# Altium schematic symbol library TitansLib.SchLib: 462 symbols (part 2 of 24)
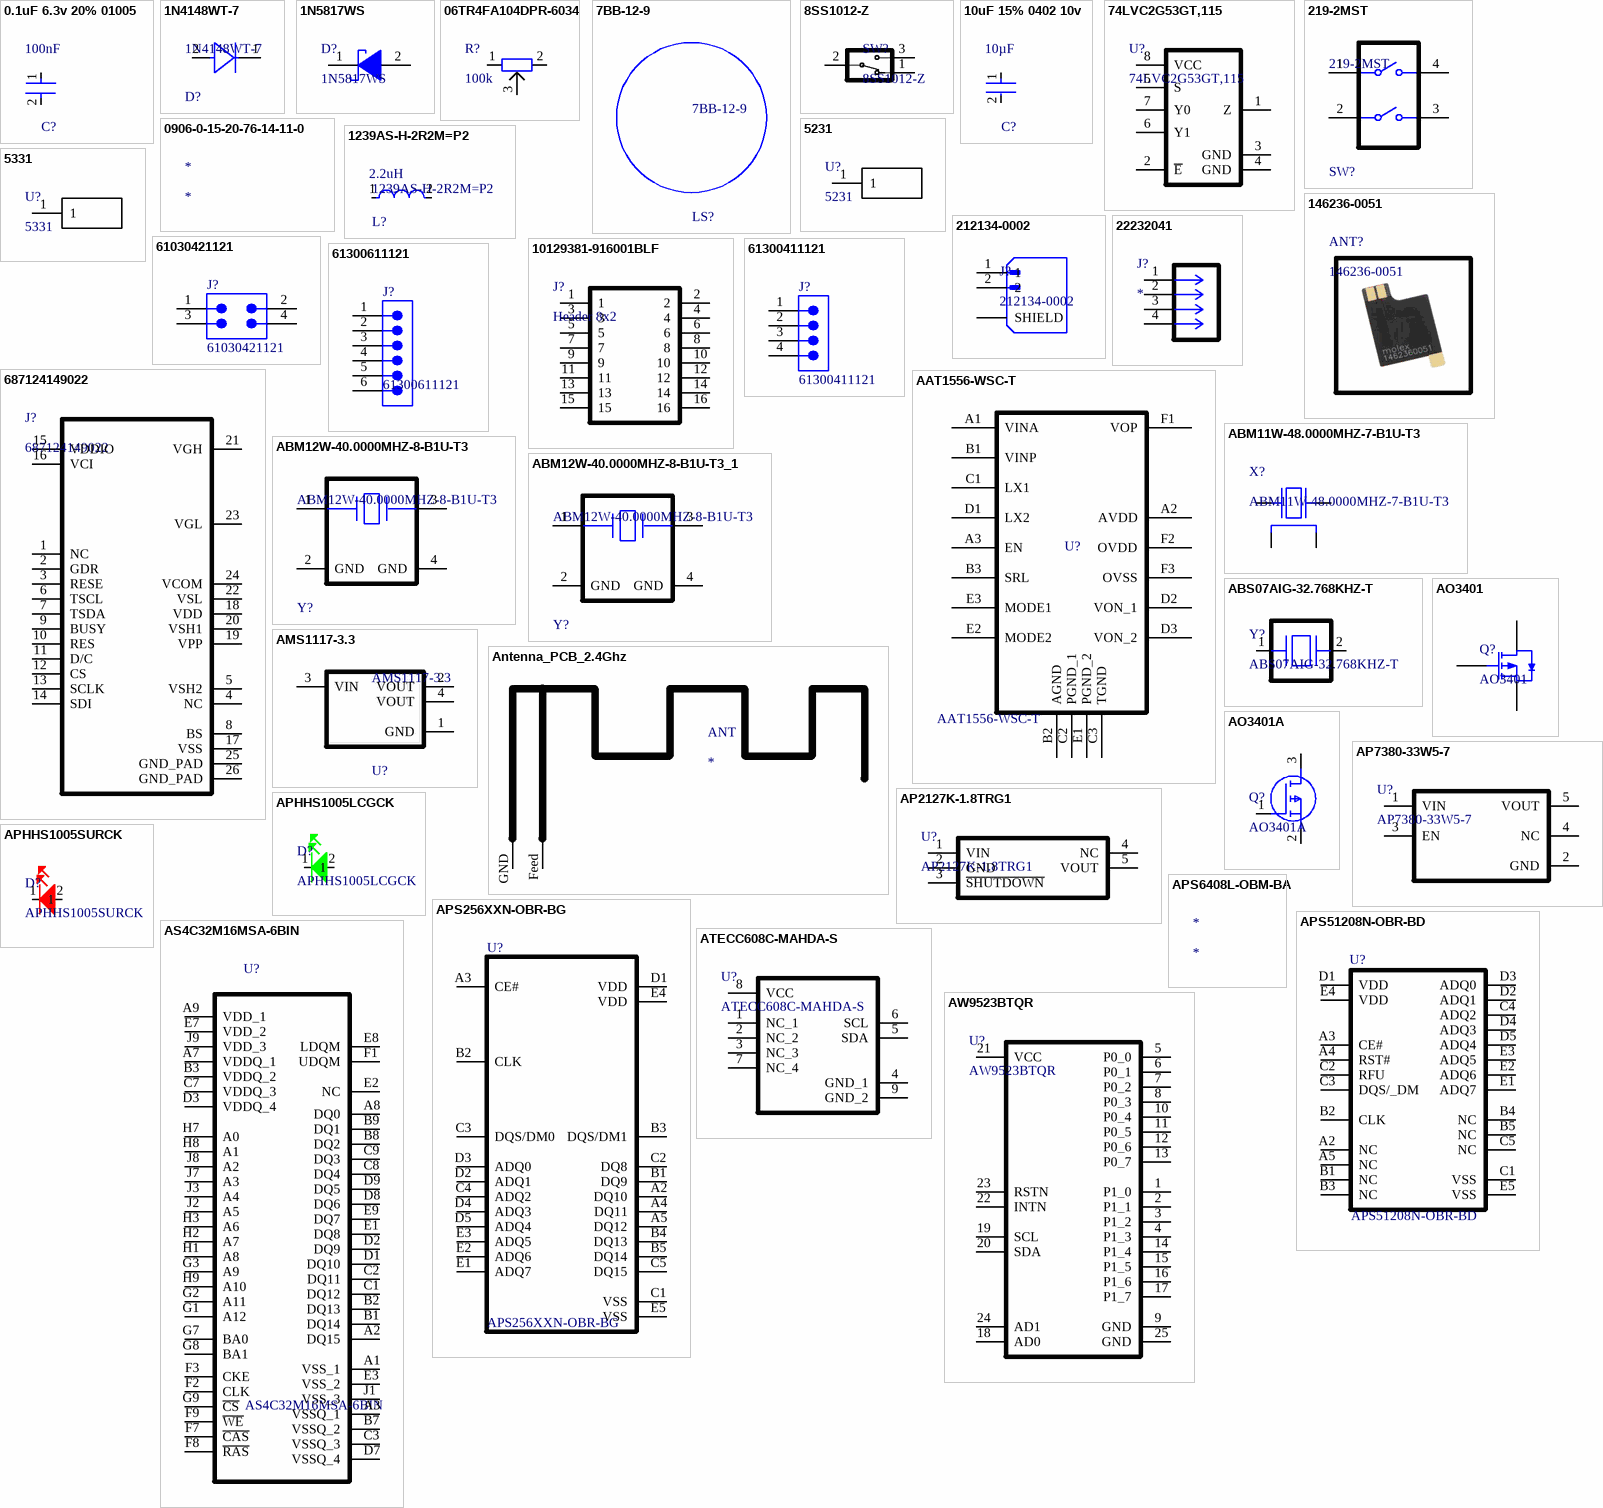
[diagram p18: symbols 0.1uF 6.3v 20% 01005 to AW9523BTQR]

## ABM12W-40.0000MHZ-8-B1U-T3_1
designator Y?, comment ABM12W-40.0000MHZ-8-B1U-T3
Crystal, Quartz, 40 MHz, SMD, 1.6mm x 1.2mm x 0.4mm, 10 ppm, 8 pF, 10 ppm, ABM12W; Manufacturer: Abracon; ESR (Equivalent Series Resistance): 80Ω; Frequency: 40MHz; Frequency Stability: 10ppm; Frequency Tolerance: 0.001%; Load Capacitance: 8pF; Supplier: DigiKey; Supplier Part Number: 535-13991-1-ND; Manufacturer Part Number: ABM12W-40.0000MHZ-8-B1U-T3; RoHS: Compliant; Category: Crystals; Stock: 8820; Pricing: 1=0.92, 10=0.803, 25=0.7596, 50=0.7284, 100=0.6982, 250=0.66028, 500=0.60768, 1000=0.58287 (USD); China RoHS: Compliant; Height: 400µm; Introduction Date: 2018-02-12; Length: 1.6mm; Lifecycle Status: Production; Max Operating Temperature: 70°C; Min Operating Temperature: -20°C; Mounting Technology: Surface Mount; REACH SVHC: Yes; ESR: 80Ω; Tolerance: 0.001%; Width: 1.2mm; ComponentLink1URL: https://datasheet.octopart.com:443/ABM12W-40.0000MHZ-8-B1U-T3-Abracon-datasheet-154833169.pdf?src-supplier=Master+Electronics; ComponentLink1Description: https://datasheet.octopart.com:443/ABM12W-40.0000MHZ-8-B1U-T3-Abracon-datasheet-154833169.pdf?src-supplier=Master+Electronics; ComponentLink2URL: https://datasheet.octopart.com:443/ABM12W-40.0000MHZ-8-B1U-T3-Abracon-datasheet-117059061.pdf?src-supplier=element14+APAC; ComponentLink2Description: https://datasheet.octopart.com:443/ABM12W-40.0000MHZ-8-B1U-T3-Abracon-datasheet-117059061.pdf?src-supplier=element14+APAC; ComponentLink3URL: https://datasheet.octopart.com:443/ABM12W-40.0000MHZ-8-B1U-T3-Abracon-datasheet-102760956.pdf?src-supplier=Sager+Electronics; ComponentLink3Description: https://datasheet.octopart.com:443/ABM12W-40.0000MHZ-8-B1U-T3-Abracon-datasheet-102760956.pdf?src-supplier=Sager+Electronics; ComponentLink4URL: https://sigma.octopart.com:443/141159861/technical_drawing/Abracon-ABM12W-40.0000MHZ-8-B1U-T3.pdf?src-supplier=Abracon+SCT; ComponentLink4Description: https://sigma.octopart.com:443/141159861/technical_drawing/Abracon-ABM12W-40.0000MHZ-8-B1U-T3.pdf?src-supplier=Abracon+SCT; ComponentLink5URL: http://sigma.octopart.com:80/conflict_mineral_statement/Abracon-company-27.pdf?src-supplier=Compliance+Statements; ComponentLink5Description: http://sigma.octopart.com:80/conflict_mineral_statement/Abracon-company-27.pdf?src-supplier=Compliance+Statements; Supplier 1: DigiKey; Supplier Part Number 1: 535-13991-1-ND; Supplier 2: DigiKey; Supplier Part Number 2: 535-13991-2-ND; Supplier 3: Mouser; Supplier Part Number 3: 815-12W40-8B1UT
footprint ABM12W
pins: 1, 2 GND (power), 3, 4 GND (power)

## ABS07AIG-32.768KHZ-T
designator Y?
Parallel - Fundamental Quartz Crystal, 0.032768MHz Nom; Manufacturer: Abracon; Supplier: Digikey; Supplier Part Number: 535-13348-1-ND; Manufacturer Part Number: ABS07AIG-32.768KHZ-T; RoHS: Yes; Category: Crystals; Stock: 246; Pricing: 1=0.56, 10=0.491, 25=0.4644, 50=0.445, 100=0.4266, 250=0.40344, 500=0.38168, 1000=0.37073 (USD); Crystal/Resonator Type: PARALLEL - FUNDAMENTAL; Manufacturer Series: ABS07AIG; Reach SVHC Compliant: Yes; RoHS Compliant: Yes; ComponentLink1URL: https://datasheet.ciiva.com:443/pdfs/VipMasterIC/IC/ABRC/ABRC-S-A0001742469/ABRC-S-A0001742469-1.pdf?src-supplier=IHS+Markit; ComponentLink1Description: https://datasheet.ciiva.com:443/pdfs/VipMasterIC/IC/ABRC/ABRC-S-A0001742469/ABRC-S-A0001742469-1.pdf?src-supplier=IHS+Markit; ComponentLink2URL: http://www.farnell.com/datasheets/2581430.pdf?src-supplier=Farnell; ComponentLink2Description: http://www.farnell.com/datasheets/2581430.pdf?src-supplier=Farnell; ComponentLink3URL: https://abracon.com/Support/flyer/AutoGrade-AIG-Crystals.pdf?src-supplier=Digikey; ComponentLink3Description: https://abracon.com/Support/flyer/AutoGrade-AIG-Crystals.pdf?src-supplier=Digikey; ComponentLink4URL: https://abracon.com/AIGcrystals/ABS07AIG.pdf?src-supplier=Digikey; ComponentLink4Description: https://abracon.com/AIGcrystals/ABS07AIG.pdf?src-supplier=Digikey; ComponentLink5URL: https://datasheet.octopart.com/ABS07AIG-32.768KHZ-T-Abracon-datasheet-103422647.pdf?src-supplier=Future+Electronics; ComponentLink5Description: https://datasheet.octopart.com/ABS07AIG-32.768KHZ-T-Abracon-datasheet-103422647.pdf?src-supplier=Future+Electronics; ComponentLink6URL: https://datasheet.octopart.com/ABS07AIG-32.768KHZ-T-Abracon-datasheet-101745425.pdf?src-supplier=Master+Electronics; ComponentLink6Description: https://datasheet.octopart.com/ABS07AIG-32.768KHZ-T-Abracon-datasheet-101745425.pdf?src-supplier=Master+Electronics
footprint ABS07AIG-32.768KHZ-T
pins: 1, 2

## AMS1117-3.3
designator U?
LDO Voltage Regulators 1A, 3.3V; Manufacturer: Advanced Monolithic Systems; Dropout Voltage: 1.1V; Output Type: Fixed; Nominal Supply Current: 5mA; Max Power Dissipation: 1.2W; Max Supply Voltage: 15V; Number Of Outputs: 1; Standoff Height: 0.64mm; Max Junction Temp: +125°C; Height: 1.8mm; Package: AMS1117; Device Class L2: Power Management ICs; ComponentLink2Description: Datasheet; ComponentLink2URL: http://www.advanced-monolithic.com/pdf/ds1117.pdf; Category: IC; RoHS: TRUE; Automotive: No; Device Class L1: Integrated Circuits (ICs); Output Current: 1A; Device Class L3: Voltage Regulators - Linear; Temperature: -40°C to +125°C; Output Voltage: 3.3V; Manufacturer Part Number: AMS1117-3.3; Temperature Range Low: -40°C; Octopart: https://octopart.com/ams1117-3.3-advanced+monolithic+systems-25899300; Lead Free: Yes; Ipc Land Pattern Name: SOT229P700X180-4; Temperature Range High: +125°C
footprint FP-ams1117-IPC_A
footprint FP-ams1117-IPC_B
footprint FP-ams1117-IPC_C
pins: 1 GND (power), 2 VOUT, 3 VIN (power), 4 VOUT

## Antenna_PCB_2.4Ghz
designator ANT
ST ELECTRONICS BASED ANTENNA DESIGN
footprint Antenna_PCB_2.4Ghz_ftprt
pins: Feed, GND

## AO3401
designator Q?
Small Signal Field-Effect Transistor, 4A I(D), 30V, 1-Element, P-Channel, Silicon, Metal-oxide Semiconductor FET; Manufacturer: Alpha & Omega Semiconductor; Manufacturer Part Number: AO3401A; Package Body Material: Plastic; Drain-source On Resistance-Max: 50mR; Number of Elements: 1; Operating Mode: ENHANCEMENT MODE; Transistor Application: SWITCHING; Power Dissipation-Max (Abs): 1.4W; Supplier: Digikey; Supplier Part Number: 785-1001-1-ND; RoHS: Yes; Category: MOSFETs; Stock: 390364; Pricing: 1=0.46, 10=0.282, 100=0.1787, 500=0.1337, 1000=0.11915, 3000=0.10063, 6000=0.0913, 9000=0.08654, 15000=0.08118, 21000=0.07801, 30000=0.07493, 75000=0.06817 (USD); Pins: 3; Package Shape: Rectangular; Transistor Element Material: SILICON; Max Operating Temperature: 150°C; Polarity/Channel Type: P-CHANNEL; Drain Current-Max (ID): 4A; DS Breakdown Voltage-Min: 30V; FET Technology: METAL-OXIDE SEMICONDUCTOR; JESD-30 Code: R-PDSO-G3; Package Style: SMALL OUTLINEMeter; Surface Mount: Yes; Terminal Form: Gull Wing; Terminal Position: DUAL; Drain Current-Max (Abs) (ID): 4A; RoHS Compliant: Yes; Reach SVHC Compliant: Yes; ComponentLink1URL: https://datasheet.ciiva.com:443/pdfs/VipMasterIC/IC/ALOM/ALOMS00379/ALOMS00379-1.pdf?src-supplier=IHS+Markit; ComponentLink1Description: https://datasheet.ciiva.com:443/pdfs/VipMasterIC/IC/ALOM/ALOMS00379/ALOMS00379-1.pdf?src-supplier=IHS+Markit; ComponentLink2URL: https://datasheet.ciiva.com/940/ao3401a-940720.pdf?src-supplier=Digikey; ComponentLink2Description: https://datasheet.ciiva.com/940/ao3401a-940720.pdf?src-supplier=Digikey; ComponentLink3URL: https://datasheet.ciiva.com/26927/getdatasheetpartid-79048-26927888.pdf?src-supplier=Verical; ComponentLink3Description: https://datasheet.ciiva.com/26927/getdatasheetpartid-79048-26927888.pdf?src-supplier=Verical
footprint SOT23-3 (SOT23, 3-Leads, Body 2,93x2,66mm, Pitch 0,95mm, IPC Low Density)
pins: 1 G, 2 S, 3 D

## AO3401A
designator Q?
MOSFET P-CH 30V 4A SOT-23; Manufacturer 1: Alpha & Omega Semiconductors; Datasheet Link: https://www.lcsc.com/datasheet/C15127.pdf; Height: 1.25mm; Manufacturer Part Number 1: AO3401A; Supplier Part Number 1: C15127; Supplier 1: LCSC; Supplier Unit Price 1: 0.0583; Supplier Link 1: https://www.lcsc.com/product-detail/C15127.html?s_z=n_AO3401A
footprint SOT95P280X125-3N
pins: 1 G, 2 S, 3 D

## AP2127K-1.8TRG1
designator U?
LDO Voltage Regulators 300mA CMOS LDO 2.5V to 6V; Manufacturer_Name: Diodes Incorporated; Datasheet Link: https://www.diodes.com//assets/Datasheets/AP2127.pdf; Height: 1.45mm; Manufacturer Part Number: AP2127K-1.8TRG1; Mouser Part Number: 621-AP2127K-1.8TRG1; Mouser Price/Stock: https://www.mouser.co.uk/ProductDetail/Diodes-Incorporated/AP2127K-1.8TRG1?qs=x6A8l6qLYDDmU4WXw4%252BBlA%3D%3D; Arrow Part Number: AP2127K-1.8TRG1; Arrow Price/Stock: https://www.arrow.com/en/products/ap2127k-1.8trg1/diodes-incorporated?region=nac; Supplier 1: DigiKey; Supplier Part Number 1: AP2127K-1.8TRG1DICT-ND; Supplier 2: DigiKey; Supplier Part Number 2: AP2127K-1.8TRG1DIDKR-ND; Supplier 3: Mouser; Supplier Part Number 3: 621-AP2127K-1.8TRG1
footprint SOT95P280X145-5N (SOT23, 5-Leads, Body 2.90x2.80mm, Pitch 0.95mm, IPC Medium Density)
pins: 1 VIN, 2 GND, 3 ~{SHUTDOWN}, 4 NC, 5 VOUT

## AP7380-33W5-7
designator U?
AP7380 Series 150 mA 3.3V Positive Voltage Surface Mount ULDO Regulator - SOT-25; Manufacturer 1: Diodes Inc.; Max Supply Voltage: 24V; Max Junction Temperature (Tj): 125°C; Min Input Voltage: 3.5V; Number of Channels: 1; Voltage Tolerance: 1%; Supplier 1: DigiKey; Supplier Part Number 1: AP7380-33W5-7DICT-ND; Manufacturer Part Number 1: AP7380-33W5-7; RoHS: Compliant; Category: LDO Voltage Regulators; Stock: 14975; Supplier Unit Price 1: 0.27; China RoHS: Compliant; Height - Seated (Max): 1.4mm; Length: 3mm; Lifecycle Status: Production; Number of Circuits: 1; Number of Outputs: 1; Number of Terminals: 5; Output Voltage: 3.3V; REACH SVHC: Yes; Schedule B: 8542390000|8542390000|8542390000|8542390000|8542390000|8542390000|8542390000|8542390000|8542390000|8542390000|8542390000|8542390000|8542390000|8542390000|8542390000|8542390000|8542390000|8542390000|8542390000|8542390000|8542390000|8542390000|8542390000|85; Terminal Pitch: 950µm; Width: 1.6mm; ComponentLink1URL: https://datasheet.octopart.com:443/AP7380-33W5-7-Diodes-Inc.-datasheet-141402626.pdf?src-supplier=IHS; ComponentLink1Description: https://datasheet.octopart.com:443/AP7380-33W5-7-Diodes-Inc.-datasheet-141402626.pdf?src-supplier=IHS; ComponentLink2URL: https://datasheet.octopart.com:443/AP7380-33W5-7-Diodes-Inc.-datasheet-99887085.pdf?src-supplier=HQonline; ComponentLink2Description: https://datasheet.octopart.com:443/AP7380-33W5-7-Diodes-Inc.-datasheet-99887085.pdf?src-supplier=HQonline
footprint SOT95P285X140-5N (SOT23, 5-Leads, Body 3.00x2.85mm, Pitch 0.95mm, IPC Medium Density)
pins: 1 VIN, 2 GND, 3 EN, 4 NC, 5 VOUT

## APHHS1005LCGCK
designator D?
1.9 V 0402 3.5mcd Green Clear 570nm Rectangle Flat Top Surface Mount LED - SMD-2; Manufacturer: Kingbright; Forward Current: 30mA; Number of Circuits: 1; Peak Wavelength: 574nm; Shape: Rectangular; Viewing Angle: 120°; Supplier: DigiKey; Supplier Part Number: 754-2121-1-ND; Manufacturer Part Number: APHHS1005LCGCK; RoHS: Compliant; Category: LEDs; Stock: 59903; Pricing: 1=0.32, 10=0.222, 100=0.1567, 500=0.12708, 1000=0.11731 (USD); China RoHS: Compliant; Color: Green; Contact Plating: Tin; Height: 500µm; Lifecycle Status: Production; Luminous Intensity: 3.5mcd; Max Operating Temperature: 85°C; Min Operating Temperature: -40°C; Mounting Technology: Surface Mount; Number of Terminals: 2; REACH SVHC: Yes; Schedule B: 8541402000, 8541402000|8541402000|8541402000|8541402000|8541402000; Terminal Pitch: 900µm; Wavelength: 570nm; ComponentLink1URL: https://datasheet.octopart.com:443/APHHS1005LCGCK-Kingbright-datasheet-180516598.pdf?src-supplier=IHS; ComponentLink1Description: https://datasheet.octopart.com:443/APHHS1005LCGCK-Kingbright-datasheet-180516598.pdf?src-supplier=IHS; ComponentLink2URL: https://datasheet.octopart.com:443/APHHS1005LCGCK-Kingbright-datasheet-155662661.pdf?src-supplier=Future+Electronics; ComponentLink2Description: https://datasheet.octopart.com:443/APHHS1005LCGCK-Kingbright-datasheet-155662661.pdf?src-supplier=Future+Electronics; ComponentLink3URL: https://datasheet.octopart.com:443/APHHS1005LCGCK-Kingbright-datasheet-145361705.pdf?src-supplier=Kingbright+SCT; ComponentLink3Description: https://datasheet.octopart.com:443/APHHS1005LCGCK-Kingbright-datasheet-145361705.pdf?src-supplier=Kingbright+SCT
footprint APHHS1005LCGCK
pins: 1, 2

## APHHS1005SURCK
designator D?
APHHS1005SURCK Red Led, 630 Nm 1005 (0402) Clear, Rectangle Lens SMD Package; Manufacturer: Kingbright; Dominant Wavelength: 630nm; Forward Current: 30mA; Forward Voltage: 2.5V; Lens Style: Clear, Flat; Luminous Intensity: 140mcd; Max Junction Temperature (Tj): 115°C; Number of Circuits: 1; Peak Wavelength: 650nm; Power Dissipation: 75mW; Reverse Voltage: 5V; Shape: Rectangular; Test Current: 20mA; Viewing Angle: 120°; Supplier: DigiKey; Supplier Part Number: 754-1104-6-ND; Manufacturer Part Number: APHHS1005SURCK; RoHS: Compliant; Category: LEDs; Stock: 213656; Pricing: 1=0.31, 10=0.215, 100=0.1517, 500=0.12294, 1000=0.11343 (USD); Case/Package: 0402; Case Code (Imperial): 0402; Case Code (Metric): 1005; China RoHS: Compliant; Color: Red; Height: 500µm; Illumination Color: Red; Lead Free: Lead Free; Length: 1mm; Lens Color: Clear; Lifecycle Status: Production; Max Operating Temperature: 85°C; Min Operating Temperature: -40°C; Mounting Technology: Surface Mount; Number of LEDs: 1; Pins: 2; Number of Terminals: 2; Packaging: Cut Tape (CT); REACH SVHC: Yes; Schedule B: 8541402000, 8541402000|8541402000, 8541402000|8541402000|8541402000, 8541402000|8541402000|8541402000|8541402000; Terminal Pitch: 1.1mm; Wavelength: 630nm; Width: 500µm; ComponentLink1URL: https://datasheet.octopart.com:443/APHHS1005SURCK-Kingbright-datasheet-180516619.pdf?src-supplier=IHS; ComponentLink1Description: https://datasheet.octopart.com:443/APHHS1005SURCK-Kingbright-datasheet-180516619.pdf?src-supplier=IHS; ComponentLink2URL: https://datasheet.octopart.com:443/APHHS1005SURCK-Kingbright-datasheet-180508364.pdf?src-supplier=IHS; ComponentLink2Description: https://datasheet.octopart.com:443/APHHS1005SURCK-Kingbright-datasheet-180508364.pdf?src-supplier=IHS; ComponentLink3URL: https://datasheet.octopart.com:443/APHHS1005SURCK-Kingbright-datasheet-137333100.pdf?src-supplier=Kingbright+SCT; ComponentLink3Description: https://datasheet.octopart.com:443/APHHS1005SURCK-Kingbright-datasheet-137333100.pdf?src-supplier=Kingbright+SCT; ComponentLink4URL: https://datasheet.octopart.com:443/APHHS1005SURCK-Kingbright-datasheet-12529969.pdf?src-supplier=Sager+Electronics; ComponentLink4Description: https://datasheet.octopart.com:443/APHHS1005SURCK-Kingbright-datasheet-12529969.pdf?src-supplier=Sager+Electronics; ComponentLink5URL: https://datasheet.octopart.com:443/APHHS1005SURCK-Kingbright-datasheet-9635231.pdf?src-supplier=RS+(Formerly+Allied+Electronics); ComponentLink5Description: https://datasheet.octopart.com:443/APHHS1005SURCK-Kingbright-datasheet-9635231.pdf?src-supplier=RS+(Formerly+Allied+Electronics)
footprint APHHS1005SURCK
pins: 1, 2

## APS256XXN-OBR-BG
designator U?
Memory, DDR PSRAM, 1V8, 256Mbit, 200MHz, BGA-24; Manufacturer: AP Memory; ComponentLink1URL: http://tunmcdsvn.tun.st.com/Component_Documentation_Library/Trunk/IC/AP_MEMORY_TECHNOLOGY_CORP_APS256XXN-OBR-BG; Supplier: Mouser; Supplier Part Number: 878-APS256XXN-OBR-BG; Manufacturer Part Number: APS256XXN-OBR-BG; Category: Uncategorized; Stock: 11795; Pricing: 1=3.03, 10=2.72, 50=2.53, 100=2.39, 1000=2.19, 10000=2.11 (USD); Supplier 1: Mouser; Supplier Part Number 1: 878-APS256XXN-OBR-BG
footprint ICC_BGA24_5X5-BALL-ARRAY_6X8_P1
pins: A2 DQ10, A3 CE#, A4 DQ11, A5 DQ12, B1 DQ9, B2 CLK, B3 DQS/DM1, B4 DQ13, B5 DQ14, C1 VSS, C2 DQ8, C3 DQS/DM0, C4 ADQ2, C5 DQ15, D1 VDD, D2 ADQ1, D3 ADQ0, D4 ADQ3, D5 ADQ4, E1 ADQ7, E2 ADQ6, E3 ADQ5, E4 VDD, E5 VSS

## APS6408L-OBM-BA
designator *

## APS51208N-OBR-BD
designator U?
DRAM IoT RAM 512Mb OPI (x8) DDR 200MHz, 1.8V, Ind. Temp., BGA24; Manufacturer_Name: AP Memory; Geometry.Height: 1.2mm; Manufacturer_Part_Number: APS51208N-OBR-BD; Mouser Part Number: 878-APS51208N-OBR-BD; Mouser Price/Stock: https://www.mouser.co.uk/ProductDetail/AP-Memory/APS51208N-OBR-BD?qs=IS%252B4QmGtzzoQA3huE4r%252BOw%3D%3D; Arrow Part Number: *; Arrow Price/Stock: *; Datasheet Link: https://www.mouser.de/datasheet/2/1127/APM_PSRAM_OPI_Xccela_APS25608N_OBRx_v1_0_PKG-1954871.pdf
footprint BGA24C100P5X5_600X800X120
pins: A2 NC, A3 CE#, A4 RST#, A5 NC, B1 NC, B2 CLK, B3 NC, B4 NC, B5 NC, C1 VSS, C2 RFU, C3 DQS/_DM, C4 ADQ2, C5 NC, D1 VDD, D2 ADQ1, D3 ADQ0, D4 ADQ3, D5 ADQ4, E1 ADQ7, E2 ADQ6, E3 ADQ5, E4 VDD, E5 VSS

## AS4C32M16MSA-6BIN
designator U?
DRAM 512M 166MHz 32Mx16 Mobile LP SDRAM IT; Manufacturer_Name: Alliance Memory; Geometry.Height: 1mm; Mouser Part Number: 913-AS4C32M16MSA6BIN; Mouser Price/Stock: https://www.mouser.co.uk/ProductDetail/Alliance-Memory/AS4C32M16MSA-6BIN?qs=rrS6PyfT74fTK5vqF8kDKg%3D%3D; Manufacturer_Part_Number: AS4C32M16MSA-6BIN; Datasheet Link: https://www.mouser.co.uk/datasheet/2/12/20180115_AllianceMemory_512M_LPSDRAM_AS4C32M16MSA--1282155.pdf
footprint BGA54C80P9X9_800X800X100
footprint AS4C32M16MSA-6BIN (BGA54C80P9X9_800X800X100)
pins: A1 VSS_1, A2 DQ15, A3 VSSQ_1, A7 VDDQ_1, A8 DQ0, A9 VDD_1, B1 DQ14, B2 DQ13, B3 VDDQ_2, B7 VSSQ_2, B8 DQ2, B9 DQ1, C1 DQ12, C2 DQ11, C3 VSSQ_3, C7 VDDQ_3, C8 DQ4, C9 DQ3, D1 DQ10, D2 DQ9, D3 VDDQ_4, D7 VSSQ_4, D8 DQ6, D9 DQ5, E1 DQ8, E2 NC, E3 VSS_2, E7 VDD_2, E8 LDQM, E9 DQ7, F1 UDQM, F2 CLK, F3 CKE, F7 ~{CAS}, F8 ~{RAS}, F9 ~{WE}, G1 A12, G2 A11, G3 A9, G7 BA0, G8 BA1, G9 ~{CS}, H1 A8, H2 A7, H3 A6, H7 A0, H8 A1, H9 A10, J1 VSS_3, J2 A5, J3 A4, J7 A3, J8 A2, J9 VDD_3

## ATECC608C-MAHDA-S
designator U?
Security ICs / Authentication ICs ECC/ECDH, I2C, small 3K reel UDFN; Manufacturer 1: Microchip; Datasheet Link: https://ww1.microchip.com/downloads/aemDocuments/documents/SCBU/ProductDocuments/DataSheets/ATECC608C-CryptoAuthentication-Summary-Data-Sheet-DS40002513.pdf; Height: 0.6mm; Manufacturer Part Number 1: ATECC608C-MAHDA-S; Supplier Part Number 1: 579-ATECC608CMAHDAS; Supplier Unit Price 1: 0.8; Supplier 1: Mouser; Supplier Link 1: https://www.mouser.com/ProductDetail/Microchip-Technology/ATECC608C-MAHDA-S?qs=pBunHO6%252BwtFnBbwu0VNrWg%3D%3D&srsltid=AfmBOoo8i3_opzmZCJ-imqKuYkWUpJbPU66Vno_jvZ8jLd-lzOjjlhRU
footprint SON50P300X200X60-9N
pins: 1 NC_1, 2 NC_2, 3 NC_3, 4 GND_1, 5 SDA, 6 SCL, 7 NC_4, 8 VCC, 9 GND_2

## AW9523BTQR
designator U?
16 400kHz I2C TQFN-24-EP(4x4) I/O Expanders ROHS; Manufacturer: AWINIC; Manufacturer Part Number: AW9523BTQR; Supplier: LCSC
footprint QFN50P400X400X75_HS-25N (QFN, 24-Leads, Body 4.00x4.00mm, Pitch 0.50mm, Thermal Pad 2.70x2.70mm, IPC Medium Density)
pins: 1 P1_0, 2 P1_1, 3 P1_2, 4 P1_3, 5 P0_0, 6 P0_1, 7 P0_2, 8 P0_3, 9 GND, 10 P0_4, 11 P0_5, 12 P0_6, 13 P0_7, 14 P1_4, 15 P1_5, 16 P1_6, 17 P1_7, 18 AD0, 19 SCL, 20 SDA, 21 VCC, 22 INTN, 23 RSTN, 24 AD1, 25 GND

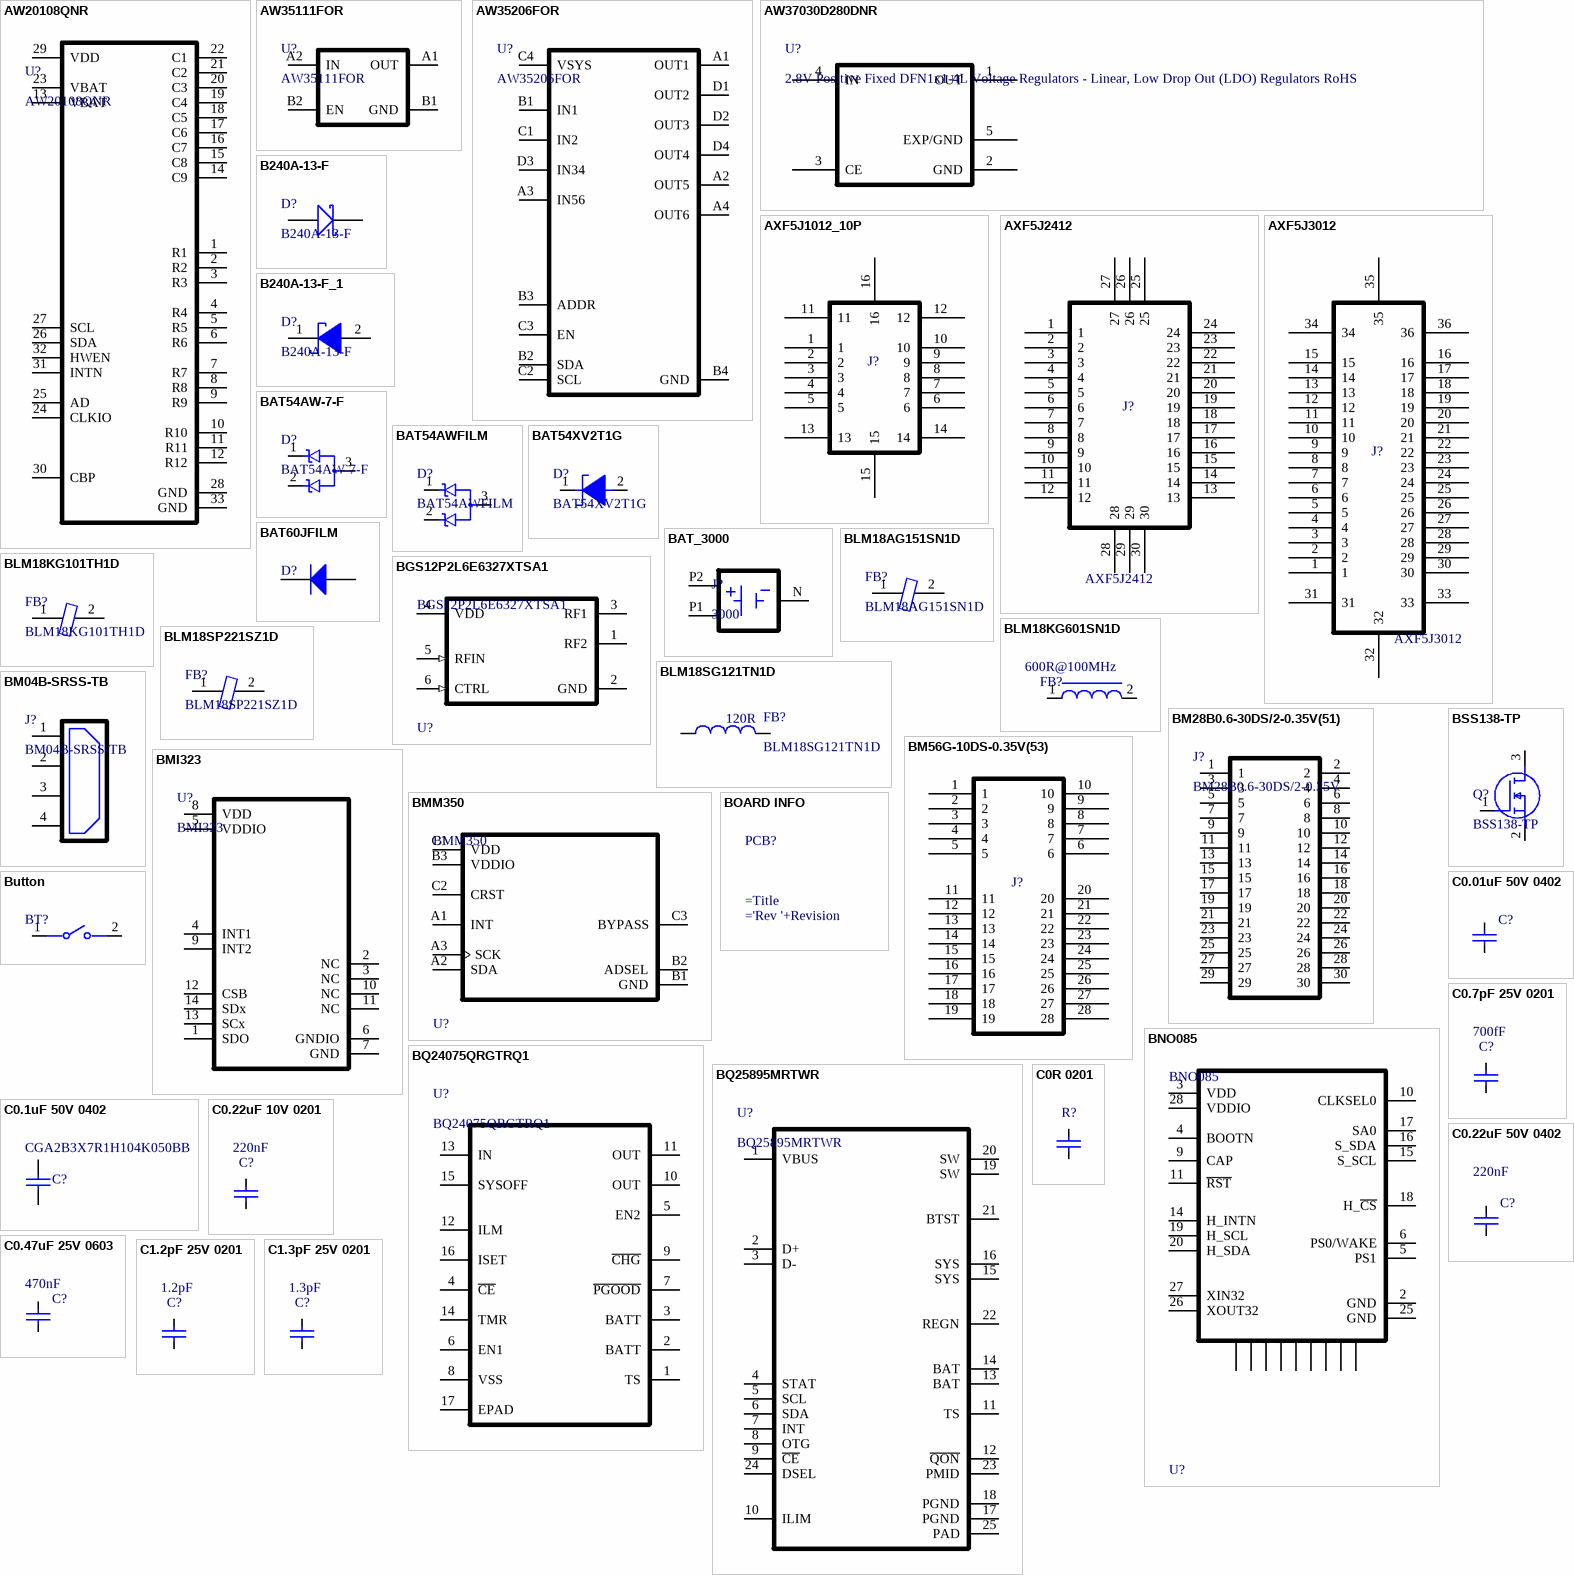
[diagram p1: symbols AW20108QNR to C1.3pF 25V 0201]

## AW20108QNR
designator U?
9×12 MATRIX LED DRIVER WITH AUTO BREATH; Manufacturer: awinic; Manufacturer Part Number: AW20108QNR; Category: Integrated Circuit; ComponentLink1Description: LCSC; ComponentLink1URL: https://www.lcsc.com/product-detail/C401022.html?s_z=n_AW20108QNR
footprint AW20108QNR (QFN, 32-Leads, Body 4.00x4.00mm, Pitch 0.40mm, Thermal Pad 2.60x2.60mm, IPC Medium Density)
pins: 1 R1, 2 R2, 3 R3, 4 R4, 5 R5, 6 R6, 7 R7, 8 R8, 9 R9, 10 R10, 11 R11, 12 R12, 13 VBAT, 14 C9, 15 C8, 16 C7, 17 C6, 18 C5, 19 C4, 20 C3, 21 C2, 22 C1, 23 VBAT, 24 CLKIO, 25 AD, 26 SDA, 27 SCL, 28 GND, 29 VDD, 30 CBP, 31 INTN, 32 HWEN, 33 GND

## AW35111FOR
designator U?
Manufacturer Part Number: AW35111FOR
footprint BGA4C40P2X2_80X80X54 (BGA, 4-Leads, Body 0.80x0.80mmx0.54mm, Pitch 0.40mm)
pins: A1 OUT, A2 IN, B1 GND, B2 EN

## AW35206FOR
designator U?
Single-bit dual-supply transceiver with configurable voltage-level shifting 6-SC70 -40 to 125; Manufacturer: AWINIC; Manufacturer Lifecycle Status: ACTIVE; Maximum Continuous Current: 2; Input voltage: 1.2V to 5.5V; Supply voltage: 1.5V to 5.5V; Data Rate: 420Mbps; Max Junction Temperature (Tj): 150°C; Nominal Supply Current: 3µA; Number of Bits: 1; Propagation Delay: 11ns; Topology: Push-Pull; Manufacturer Part Number: AW35206FOR; Supplier: DigiKey; Supplier Part Number: 296-SN74LXCH1T45DCKRCT-ND; RoHS: Compliant; Category: Voltage Level Shifters; Stock: 3155; Pricing: 1=0.67, 10=0.473, 25=0.4244, 100=0.3711, 250=0.34556, 500=0.33016, 1000=0.32436 (USD); Ambient Temperature Range High: 125°C; Height: 1.1mm; Length: 2mm; Lifecycle Status: Production; Max Operating Temperature: 125°C; Min Operating Temperature: -40°C; Number of Circuits: 1; Number of Inputs: 1; Number of Outputs: 1; Pins: 6; Thickness: 900µm; Width: 1.25mm; ComponentLink1URL: https://octopart.com:443/opatz8j6/c1?t=Q569tHSjaj1zDgVJg-7m9sm-kh_ek9iRnXusho9QMoevz2mmcR9LhMcLdA-ONU2poXBdUb9Msvxh0FVyrrqpo1Dz3Swg2etjiHL7zcgSVt9dFh5FuB62_2qgeqwLRMO4C4gi-7cVfXy0AEA8Dt3YsT_MxOeEKQMLdObwaWzkqlaCPR8y75jOk8o6gf1LL7TXuSatyjalP8TRlF5sWeqEuXGlYodzmtrFHIiPiB-IkzQnCJh3GYqttfs84lS6npvRpqYbvQUvXsq3TJtKA8z2AFgAY_sOBxY9HnELkmDqBRorIt_hF-YiLbDT0cbf6S5ToZ2f-Ecf05XofHLyttMSMFL0B4Jtqc0mNF5X-QcUn7-Fx0c9RCF4fIxWhiQmBARgMB_kmWK4M0FRMPE&src-supplier=Texas+Instruments; ComponentLink1Description: https://octopart.com:443/opatz8j6/c1?t=Q569tHSjaj1zDgVJg-7m9sm-kh_ek9iRnXusho9QMoevz2mmcR9LhMcLdA-ONU2poXBdUb9Msvxh0FVyrrqpo1Dz3Swg2etjiHL7zcgSVt9dFh5FuB62_2qgeqwLRMO4C4gi-7cVfXy0AEA8Dt3YsT_MxOeEKQMLdObwaWzkqlaCPR8y75jOk8o6gf1LL7TXuSatyjalP8TRlF5sWeqEuXGlYodzmtrFHIiPiB-IkzQnCJh3GYqttfs84lS6npvRpqYbvQUvXsq3TJtKA8z2AFgAY_sOBxY9HnELkmDqBRorIt_hF-YiLbDT0cbf6S5ToZ2f-Ecf05XofHLyttMSMFL0B4Jtqc0mNF5X-QcUn7-Fx0c9RCF4fIxWhiQmBARgMB_kmWK4M0FRMPE&src-supplier=Texas+Instruments; ComponentLink2URL: https://sigma.octopart.com:443/182282881/technical_drawing/Texas-Instruments-SN74LXCH1T45DCKR.pdf?src-supplier=Texas+Instruments; ComponentLink2Description: https://sigma.octopart.com:443/182282881/technical_drawing/Texas-Instruments-SN74LXCH1T45DCKR.pdf?src-supplier=Texas+Instruments; ComponentLink3URL: https://sigma.octopart.com:443/178868976/technical_drawing/Texas-Instruments-SN74LXCH1T45DCKR.pdf?src-supplier=Texas+Instruments; ComponentLink3Description: https://sigma.octopart.com:443/178868976/technical_drawing/Texas-Instruments-SN74LXCH1T45DCKR.pdf?src-supplier=Texas+Instruments; ComponentLink4URL: https://datasheet.octopart.com:443/SN74LXCH1T45DCKR-Texas-Instruments-datasheet-184713126.pdf?src-supplier=Upverter; ComponentLink4Description: https://datasheet.octopart.com:443/SN74LXCH1T45DCKR-Texas-Instruments-datasheet-184713126.pdf?src-supplier=Upverter; ComponentLink5URL: https://datasheet.octopart.com:443/SN74LXCH1T45DCKR-Texas-Instruments-datasheet-182826091.pdf?src-supplier=LCSC; ComponentLink5Description: https://datasheet.octopart.com:443/SN74LXCH1T45DCKR-Texas-Instruments-datasheet-182826091.pdf?src-supplier=LCSC; ComponentLink6URL: https://datasheet.octopart.com:443/SN74LXCH1T45DCKR-Texas-Instruments-datasheet-165811838.pdf?src-supplier=SHENGYU+ELECTRONICS; ComponentLink6Description: https://datasheet.octopart.com:443/SN74LXCH1T45DCKR-Texas-Instruments-datasheet-165811838.pdf?src-supplier=SHENGYU+ELECTRONICS; ComponentLink7URL: http://sigma.octopart.com:80/reach_statement/Texas-Instruments-company-64.pdf?src-supplier=Compliance+Statements; ComponentLink7Description: http://sigma.octopart.com:80/reach_statement/Texas-Instruments-company-64.pdf?src-supplier=Compliance+Statements; ComponentLink8URL: http://sigma.octopart.com:80/conflict_mineral_statement/Texas-Instruments-company-63.pdf?src-supplier=Compliance+Statements; ComponentLink8Description: http://sigma.octopart.com:80/conflict_mineral_statement/Texas-Instruments-company-63.pdf?src-supplier=Compliance+Statements
footprint BGA16C35P4X4_150X150X54 (BGA, 16-Leads, Body 1.50x1.50mmx0.54mm, Pitch 0.35mm)
pins: A1 OUT1, A2 OUT5, A3 IN56, A4 OUT6, B1 IN1, B2 SDA, B3 ADDR, B4 GND, C1 IN2, C2 SCL, C3 EN, C4 VSYS, D1 OUT2, D2 OUT3, D3 IN34, D4 OUT4

## AW37030D280DNR
designator U?, comment 2.8V Positive Fixed DFN1x1-4L Voltage Regulators - Linear, Low Drop Out (LDO) Regulators RoHS
footprint AW37030D280DNR (PSON, 6-Leads, Body 2,05x2,05mm, Pitch 0,65mm, Thermal Pad 1,65x1,05mm, IPC High Density)
pins: 1 OUT, 2 GND, 3 CE, 4 IN, 5 EXP/GND

## AXF5J1012_10P
designator J?  (value not drawn)
Board Stacking Connector; Manufacturer: Panasonic; Manufacturer Part Number: AXF5J1012; Supplier: Arrow Electronics; Supplier Part Number: AXF5J1012; RoHS: Compliant; Category: Card Edge Connectors; Pricing: 15000=0,5572, 20000=0,5516, 21000=0,5461, 25000=0,5406, 30000=0,5352, 35000=0,5299, 40000=0,5246, 50000=0,5193, 100000=0,5141 (USD); Lifecycle Status: Production; ComponentLink1URL: https://datasheet.octopart.com:443/AXF5J1012-Panasonic-datasheet-183707634.pdf?src-supplier=Sager+Electronics; ComponentLink1Description: https://datasheet.octopart.com:443/AXF5J1012-Panasonic-datasheet-183707634.pdf?src-supplier=Sager+Electronics; Supplier 1: Mouser; Supplier Part Number 1: 769-AXF5J1012
footprint AXF5J1012 (TSSOP, 30-Leads, Body 7,70x1,45mm, Pitch 0,35mm)
pins: 1, 2, 3, 4, 5, 6, 7, 8, 9, 10, 11, 12, 13, 14, 15, 16

## AXF5J2412
designator J?
AXF5J2412 24Pin Connnector; Manufacturer: TBD; Supplier 1: Mouser; Supplier Part Number 1: 769-AXF5J2412; Manufacturer Part Number: AXF5J2412
footprint AXF5J2412 (TSSOP, 30-Leads, Body 7,70x1,45mm, Pitch 0,35mm)
pins: 1, 2, 3, 4, 5, 6, 7, 8, 9, 10, 11, 12, 13, 14, 15, 16, 17, 18, 19, 20, 21, 22, 23, 24, 25, 26, 27, 28, 29, 30

## AXF5J3012
designator J?  Manufacturer Part Number: AXF5J3012  (hidden comment: *)
AXF5J3012 30Pin Connector; Manufacturer: TBD
footprint AXF5J3012 (TSSOP, 30-Leads, Body 7,70x1,45mm, Pitch 0,35mm)
pins: 1, 2, 3, 4, 5, 6, 7, 8, 9, 10, 11, 12, 13, 14, 15, 16, 17, 18, 19, 20, 21, 22, 23, 24, 25, 26, 27, 28, 29, 30, 31, 32, 33, 34, 35, 36

## B240A-13-F
designator D?
Rectifier Diode, Schottky, 1 Phase, 1 Element, 2A, 40V V(RRM), Silicon; Manufacturer: Diodes Inc.; Value: 200pF; Element Configuration: Single; Forward Voltage: 500mV; Max Forward Surge Current (Ifsm): 50A; Number of Elements: 1; Peak Reverse Current: 500µA; Polarity: Standard; Supplier: DigiKey; Supplier Part Number: B240A-FDICT-ND; Manufacturer Part Number: B240A-13-F; RoHS: Compliant; Category: Schottky Diodes; Stock: 34549; Pricing: 1=0.18, 10=0.121, 100=0.1132, 500=0.10452 (USD); Average Rectified Current: 2A; Case/Package: SMA; China RoHS: Non-Compliant; Contact Plating: Tin; Current Rating: 2A; Forward Current: 2A; Height: 2.1mm; Lead Free: Lead Free; Length: 4.6mm; Lifecycle Status: Production; Max Operating Temperature: 150°C; Max Output current: 2A; Max Repetitive Reverse Voltage (Vrrm): 40V; Max Reverse Voltage (DC): 40V; Min Operating Temperature: -65°C; Mounting Technology: Surface Mount; Pins: 2; Number of Terminals: 2; Output Current: 2A; Packaging: Cut Tape; Peak Non-Repetitive Surge Current: 50A; Radiation Hardening: No; REACH SVHC: No; Reverse Standoff Voltage: 40V; Schedule B: 8541100080, 8541100080|8541100080|8541100080|8541100080|8541100080; Termination: SMD/SMT; Voltage Rating (DC): 40V; Weight: 64.013223mg; Width: 2.92mm; ComponentLink1URL: https://datasheet.octopart.com:443/B240A-13-F-Diodes-Inc.-datasheet-160572518.pdf?src-supplier=Newark; ComponentLink1Description: https://datasheet.octopart.com:443/B240A-13-F-Diodes-Inc.-datasheet-160572518.pdf?src-supplier=Newark; ComponentLink2URL: https://datasheet.octopart.com:443/B240A-13-F-Diodes-Inc.-datasheet-62305028.pdf?src-supplier=Newark; ComponentLink2Description: https://datasheet.octopart.com:443/B240A-13-F-Diodes-Inc.-datasheet-62305028.pdf?src-supplier=Newark; ComponentLink3URL: https://datasheet.octopart.com:443/B240A-13-F-Diodes-Inc.-datasheet-11743871.pdf?src-supplier=Newark; ComponentLink3Description: https://datasheet.octopart.com:443/B240A-13-F-Diodes-Inc.-datasheet-11743871.pdf?src-supplier=Newark; ComponentLink4URL: https://datasheet.octopart.com:443/B240A-13-F-Diodes-Inc.-datasheet-10026349.pdf?src-supplier=Newark; ComponentLink4Description: https://datasheet.octopart.com:443/B240A-13-F-Diodes-Inc.-datasheet-10026349.pdf?src-supplier=Newark; ComponentLink5URL: https://datasheet.octopart.com:443/B240A-13-F-Diodes-Inc.-datasheet-8324843.pdf?src-supplier=Newark; ComponentLink5Description: https://datasheet.octopart.com:443/B240A-13-F-Diodes-Inc.-datasheet-8324843.pdf?src-supplier=Newark; ComponentLink6URL: https://datasheet.octopart.com:443/B240A-13-F-Diodes-Inc.-datasheet-34441422.pdf?src-supplier=RS+(Formerly+Allied+Electronics); ComponentLink6Description: https://datasheet.octopart.com:443/B240A-13-F-Diodes-Inc.-datasheet-34441422.pdf?src-supplier=RS+(Formerly+Allied+Electronics); ComponentLink7URL: https://datasheet.octopart.com:443/B240A-13-F-Diodes-Inc.-datasheet-8023.pdf?src-supplier=DigiKey; ComponentLink7Description: https://datasheet.octopart.com:443/B240A-13-F-Diodes-Inc.-datasheet-8023.pdf?src-supplier=DigiKey; ComponentLink8URL: https://datasheet.octopart.com:443/B240A-13-F-Diodes-Inc.-datasheet-46751036.pdf?src-supplier=Future+Electronics; ComponentLink8Description: https://datasheet.octopart.com:443/B240A-13-F-Diodes-Inc.-datasheet-46751036.pdf?src-supplier=Future+Electronics; ComponentLink9URL: https://datasheet.octopart.com:443/B240A-13-F-Diodes-Inc.-datasheet-14053489.pdf?src-supplier=iiiC; ComponentLink9Description: https://datasheet.octopart.com:443/B240A-13-F-Diodes-Inc.-datasheet-14053489.pdf?src-supplier=iiiC; ComponentLink10URL: https://datasheet.octopart.com:443/B240A-13-F-Diodes-Inc.-datasheet-17703254.pdf?src-supplier=Jameco; ComponentLink10Description: https://datasheet.octopart.com:443/B240A-13-F-Diodes-Inc.-datasheet-17703254.pdf?src-supplier=Jameco; ComponentLink11URL: http://sigma.octopart.com:80/15616884/materials_sheet/Diodes-Inc.-B240A-13-F.pdf?src-supplier=Compliance+Statements; ComponentLink11Description: http://sigma.octopart.com:80/15616884/materials_sheet/Diodes-Inc.-B240A-13-F.pdf?src-supplier=Compliance+Statements; Supplier 1: DigiKey; Supplier Part Number 1: B240A-FDICT-ND; Supplier 2: DigiKey; Supplier Part Number 2: B240A-FDITR-ND; Supplier 3: Mouser; Supplier Part Number 3: 621-B240A-F
footprint DIOM5226X230N
pins: 1 K, 2 A

## B240A-13-F_1
designator D?, comment B240A-13-F
Rectifier Diode, Schottky, 1 Phase, 1 Element, 2A, 40V V(RRM), Silicon; Manufacturer: Diodes Inc.; Value: 200pF; Element Configuration: Single; Forward Voltage: 500mV; Max Forward Surge Current (Ifsm): 50A; Number of Elements: 1; Peak Reverse Current: 500µA; Polarity: Standard; Supplier: DigiKey; Supplier Part Number: B240A-FDICT-ND; Manufacturer Part Number: B240A-13-F; RoHS: Compliant; Category: Schottky Diodes; Stock: 34549; Pricing: 1=0.18, 10=0.121, 100=0.1132, 500=0.10452 (USD); Average Rectified Current: 2A; Case/Package: SMA; China RoHS: Non-Compliant; Contact Plating: Tin; Current Rating: 2A; Forward Current: 2A; Height: 2.1mm; Lead Free: Lead Free; Length: 4.6mm; Lifecycle Status: Production; Max Operating Temperature: 150°C; Max Output current: 2A; Max Repetitive Reverse Voltage (Vrrm): 40V; Max Reverse Voltage (DC): 40V; Min Operating Temperature: -65°C; Mounting Technology: Surface Mount; Pins: 2; Number of Terminals: 2; Output Current: 2A; Packaging: Cut Tape; Peak Non-Repetitive Surge Current: 50A; Radiation Hardening: No; REACH SVHC: No; Reverse Standoff Voltage: 40V; Schedule B: 8541100080, 8541100080|8541100080|8541100080|8541100080|8541100080; Termination: SMD/SMT; Voltage Rating (DC): 40V; Weight: 64.013223mg; Width: 2.92mm; ComponentLink1URL: https://datasheet.octopart.com:443/B240A-13-F-Diodes-Inc.-datasheet-160572518.pdf?src-supplier=Newark; ComponentLink1Description: https://datasheet.octopart.com:443/B240A-13-F-Diodes-Inc.-datasheet-160572518.pdf?src-supplier=Newark; ComponentLink2URL: https://datasheet.octopart.com:443/B240A-13-F-Diodes-Inc.-datasheet-62305028.pdf?src-supplier=Newark; ComponentLink2Description: https://datasheet.octopart.com:443/B240A-13-F-Diodes-Inc.-datasheet-62305028.pdf?src-supplier=Newark; ComponentLink3URL: https://datasheet.octopart.com:443/B240A-13-F-Diodes-Inc.-datasheet-11743871.pdf?src-supplier=Newark; ComponentLink3Description: https://datasheet.octopart.com:443/B240A-13-F-Diodes-Inc.-datasheet-11743871.pdf?src-supplier=Newark; ComponentLink4URL: https://datasheet.octopart.com:443/B240A-13-F-Diodes-Inc.-datasheet-10026349.pdf?src-supplier=Newark; ComponentLink4Description: https://datasheet.octopart.com:443/B240A-13-F-Diodes-Inc.-datasheet-10026349.pdf?src-supplier=Newark; ComponentLink5URL: https://datasheet.octopart.com:443/B240A-13-F-Diodes-Inc.-datasheet-8324843.pdf?src-supplier=Newark; ComponentLink5Description: https://datasheet.octopart.com:443/B240A-13-F-Diodes-Inc.-datasheet-8324843.pdf?src-supplier=Newark; ComponentLink6URL: https://datasheet.octopart.com:443/B240A-13-F-Diodes-Inc.-datasheet-34441422.pdf?src-supplier=RS+(Formerly+Allied+Electronics); ComponentLink6Description: https://datasheet.octopart.com:443/B240A-13-F-Diodes-Inc.-datasheet-34441422.pdf?src-supplier=RS+(Formerly+Allied+Electronics); ComponentLink7URL: https://datasheet.octopart.com:443/B240A-13-F-Diodes-Inc.-datasheet-8023.pdf?src-supplier=DigiKey; ComponentLink7Description: https://datasheet.octopart.com:443/B240A-13-F-Diodes-Inc.-datasheet-8023.pdf?src-supplier=DigiKey; ComponentLink8URL: https://datasheet.octopart.com:443/B240A-13-F-Diodes-Inc.-datasheet-46751036.pdf?src-supplier=Future+Electronics; ComponentLink8Description: https://datasheet.octopart.com:443/B240A-13-F-Diodes-Inc.-datasheet-46751036.pdf?src-supplier=Future+Electronics; ComponentLink9URL: https://datasheet.octopart.com:443/B240A-13-F-Diodes-Inc.-datasheet-14053489.pdf?src-supplier=iiiC; ComponentLink9Description: https://datasheet.octopart.com:443/B240A-13-F-Diodes-Inc.-datasheet-14053489.pdf?src-supplier=iiiC; ComponentLink10URL: https://datasheet.octopart.com:443/B240A-13-F-Diodes-Inc.-datasheet-17703254.pdf?src-supplier=Jameco; ComponentLink10Description: https://datasheet.octopart.com:443/B240A-13-F-Diodes-Inc.-datasheet-17703254.pdf?src-supplier=Jameco; ComponentLink11URL: http://sigma.octopart.com:80/15616884/materials_sheet/Diodes-Inc.-B240A-13-F.pdf?src-supplier=Compliance+Statements; ComponentLink11Description: http://sigma.octopart.com:80/15616884/materials_sheet/Diodes-Inc.-B240A-13-F.pdf?src-supplier=Compliance+Statements; Supplier 1: DigiKey; Supplier Part Number 1: B240A-FDICT-ND; Supplier 2: DigiKey; Supplier Part Number 2: B240A-FDITR-ND; Supplier 3: Mouser; Supplier Part Number 3: 621-B240A-F
footprint DIOM5226X230N
pins: 1 K, 2 A

## BAT54AW-7-F
designator D?
Diode Array 1 Pair Common Anode 30 V 200mA (DC) Surface Mount SC-70, SOT-323; Manufacturer 1: Diodes Inc.; Supplier 1: DigiKey; Supplier Part Number 1: BAT54AW-FDITR-ND; Manufacturer Part Number 1: BAT54AW-7-F; Datasheet Link: https://www.diodes.com/assets/Datasheets/BAT54W_AW_CW_SW.pdf; Stock: 15150; Supplier Unit Price 1: 0.2
footprint SOT65P210X110-3N
pins: 1 K1, 2 K2, 3 A

## BAT54AWFILM
designator D?
SMALL SIGNAL SCHOTTKY DIODE Rectifier Diode, Schottky, 2 Element, 0.3A, 40V V(RRM), Silicon; Manufacturer: STMicroelectronics; Average Rectified Current: 300mA; Value: 10pF; Element Configuration: Common Anode; Forward Voltage: 240mV; Max Forward Surge Current (Ifsm): 1A; Max Junction Temperature (Tj): 150°C; Max Reverse Leakage Current: 1µA; Number of Elements: 2; Recovery Time: 5ns; Reverse Standoff Voltage: 30V; Supplier: DigiKey; Supplier Part Number: 497-2528-1-ND; Manufacturer Part Number: BAT54AWFILM; RoHS: Compliant; Category: Schottky Diodes; Stock: 21311; Pricing: 1=0.3, 10=0.182, 100=0.1139, 500=0.08406, 1000=0.07437 (USD); Case/Package: SOT-323; China RoHS: Compliant; Current Rating: 300mA; Forward Current: 300mA; Height: 1.1mm; Length: 2mm; Lifecycle Status: Obsolete; Max Operating Temperature: 150°C; Max Output current: 300mA; Max Repetitive Reverse Voltage (Vrrm): 40V; Max Reverse Voltage (DC): 40V; Max Surge Current: 1A; Min Operating Temperature: -40°C; Mounting Technology: Surface Mount; Pins: 3; Number of Terminals: 3; Packaging: Tape and Reel; Peak Non-Repetitive Surge Current: 1A; Peak Reverse Current: 1µA; Radiation Hardening: No; REACH SVHC: Yes; Reverse Recovery Time: 5ns; Schedule B: 8541100070, 8541100070|8541100070, 8541100070|8541100070|8541100070, 8541100070|8541100070|8541100070|8541100070; Voltage Rating (DC): 30V; Weight: 4.535924g; Width: 1.25mm; ComponentLink1URL: https://datasheet.octopart.com:443/BAT54AWFILM-STMicroelectronics-datasheet-141402751.pdf?src-supplier=IHS; ComponentLink1Description: https://datasheet.octopart.com:443/BAT54AWFILM-STMicroelectronics-datasheet-141402751.pdf?src-supplier=IHS; ComponentLink2URL: https://datasheet.octopart.com:443/BAT54AWFILM-STMicroelectronics-datasheet-66581535.pdf?src-supplier=ODG+(Origin+Data+Global); ComponentLink2Description: https://datasheet.octopart.com:443/BAT54AWFILM-STMicroelectronics-datasheet-66581535.pdf?src-supplier=ODG+(Origin+Data+Global); ComponentLink3URL: https://datasheet.octopart.com:443/BAT54AWFILM-STMicroelectronics-datasheet-8484018.pdf?src-supplier=element14+APAC; ComponentLink3Description: https://datasheet.octopart.com:443/BAT54AWFILM-STMicroelectronics-datasheet-8484018.pdf?src-supplier=element14+APAC; ComponentLink4URL: https://datasheet.octopart.com:443/BAT54AWFILM-STMicroelectronics-datasheet-12520205.pdf?src-supplier=Newark; ComponentLink4Description: https://datasheet.octopart.com:443/BAT54AWFILM-STMicroelectronics-datasheet-12520205.pdf?src-supplier=Newark; ComponentLink5URL: https://datasheet.octopart.com:443/BAT54AWFILM-STMicroelectronics-datasheet-62331687.pdf?src-supplier=STMicroelectronics; ComponentLink5Description: https://datasheet.octopart.com:443/BAT54AWFILM-STMicroelectronics-datasheet-62331687.pdf?src-supplier=STMicroelectronics; ComponentLink6URL: https://datasheet.octopart.com:443/BAT54AWFILM-STMicroelectronics-datasheet-19504.pdf?src-supplier=element14; ComponentLink6Description: https://datasheet.octopart.com:443/BAT54AWFILM-STMicroelectronics-datasheet-19504.pdf?src-supplier=element14; Supplier 1: DigiKey; Supplier Part Number 1: 497-2528-1-ND; Supplier 2: DigiKey; Supplier Part Number 2: 497-2528-2-ND
footprint SOT65P210X110-3N
pins: 1 K1, 2 K2, 3 A

## BAT54XV2T1G
designator D?
Schottky Diodes & Rectifiers 30V 200mW Single; Manufacturer 1: onsemi; Datasheet Link: https://www.onsemi.com/pdf/datasheet/bat54xv2t1-d.pdf; Height: 0.7mm; Manufacturer Part Number 1: BAT54XV2T1G; Supplier Part Number 1: 863-BAT54XV2T1G; Supplier Link 1: https://www.mouser.co.uk/ProductDetail/onsemi/BAT54XV2T1G?qs=vLkC5FC1VN8vpceP7xcdrw%3D%3D; Supplier Unit Price 1: 0.14
footprint SODFL1608X70N
pins: 1 K, 2 A

## BAT60JFILM
designator D?  (value not drawn)
Diode Small Signal Schottky 10V 3A Automotive 2-Pin SOD-323 T/R; Manufacturer: STMicroelectronics; Element Configuration: Single; Forward Voltage: 320mV; Max Forward Surge Current (Ifsm): 5A; Max Junction Temperature (Tj): 150°C; Max Power Dissipation: 310mW; Max Reverse Leakage Current: 7.5µA; Number of Elements: 1; Peak Reverse Current: 2.5µA; Polarity: Standard; ComponentLink1URL: http://tunmcdsvn.tun.st.com/Component_Documentation_Library/Trunk/Diode/STMICROELECTRONICS_BAT60J_Series; Supplier: DigiKey; Supplier Part Number: 497-3707-1-ND; Manufacturer Part Number: BAT60JFILM; RoHS: Compliant; Category: Schottky Diodes; Stock: 88620; Pricing: 1=0.29, 10=0.14, 100=0.1213, 500=0.08962, 1000=0.07938 (USD); Average Rectified Current: 3A; China RoHS: Compliant; Contact Plating: Tin; Current Rating: 3A; Forward Current: 3A; Height: 1.17mm; Lead Free: Lead Free; Length: 1.8mm; Lifecycle Status: Production; Max Operating Temperature: 150°C; Max Output current: 3A; Max Repetitive Reverse Voltage (Vrrm): 10V; Max Reverse Voltage (DC): 10V; Max Surge Current: 5A; Min Operating Temperature: -65°C; Mounting Technology: Surface Mount; Pins: 2; Number of Terminals: 2; Output Current: 3A; Packaging: Tape and Reel; Peak Non-Repetitive Surge Current: 5A; Radiation Hardening: No; REACH SVHC: Yes; Reverse Standoff Voltage: 10V; Schedule B: 8541100080, 8541100080|8541100080|8541100080|8541100080|8541100080|8541100080|8541100080|8541100080|8541100080|8541100080|8541100080|8541100080|8541100080|8541100080|8541100080|8541100080|8541100080|8541100080|8541100080|8541100080|8541100080|8541100080|8541100080|85; Voltage Rating (DC): 10V; Weight: 4.535924g; Width: 1.45mm; ComponentLink2URL: https://datasheet.octopart.com:443/BAT60JFILM-STMicroelectronics-datasheet-56177.pdf?src-supplier=STMicroelectronics; ComponentLink2Description: https://datasheet.octopart.com:443/BAT60JFILM-STMicroelectronics-datasheet-56177.pdf?src-supplier=STMicroelectronics; ComponentLink3URL: https://datasheet.octopart.com:443/BAT60JFILM-STMicroelectronics-datasheet-12532682.pdf?src-supplier=TME; ComponentLink3Description: https://datasheet.octopart.com:443/BAT60JFILM-STMicroelectronics-datasheet-12532682.pdf?src-supplier=TME; ComponentLink4URL: https://datasheet.octopart.com:443/BAT60JFILM-STMicroelectronics-datasheet-181242469.pdf?src-supplier=Newark; ComponentLink4Description: https://datasheet.octopart.com:443/BAT60JFILM-STMicroelectronics-datasheet-181242469.pdf?src-supplier=Newark; ComponentLink5URL: https://datasheet.octopart.com:443/BAT60JFILM-STMicroelectronics-datasheet-14054140.pdf?src-supplier=iiiC; ComponentLink5Description: https://datasheet.octopart.com:443/BAT60JFILM-STMicroelectronics-datasheet-14054140.pdf?src-supplier=iiiC; Supplier 1: DigiKey; Supplier Part Number 1: 497-3707-1-ND; Supplier 2: DigiKey; Supplier Part Number 2: 497-3707-2-ND; Supplier 3: Mouser; Supplier Part Number 3: 511-BAT60JFILM
footprint DIO_SOD323
pins: 1 A, 2 K

## BAT_3000
designator J?, comment 3000
BATTERY RETAINER COIN 12MM SMD; Manufacturer: Keystone Electronics; Supplier: Digikey; Supplier Part Number: 36-3000-ND; Manufacturer Part Number: 3000; RoHS: Yes; Category: Batteries and Accessories; Stock: 8443; Pricing: 1=0.36, 10=0.314, 2500=0.1935, 5000=0.18295 (USD); ComponentLink1URL: https://datasheet.ciiva.com:443/pdfs/VipMasterIC/IC/KEYC/KEYCS01036/KEYCS02703-1.pdf?src-supplier=IHS+Markit; ComponentLink1Description: https://datasheet.ciiva.com:443/pdfs/VipMasterIC/IC/KEYC/KEYCS01036/KEYCS02703-1.pdf?src-supplier=IHS+Markit; ComponentLink2URL: https://datasheet.ciiva.com/11714/0900766b8002ef78-11714721.pdf?src-supplier=Rs; ComponentLink2Description: https://datasheet.ciiva.com/11714/0900766b8002ef78-11714721.pdf?src-supplier=Rs; ComponentLink3URL: https://datasheet.ciiva.com/1391/1718262-1391630.pdf?src-supplier=Element14; ComponentLink3Description: https://datasheet.ciiva.com/1391/1718262-1391630.pdf?src-supplier=Element14; ComponentLink4URL: https://datasheet.ciiva.com/3/3000-3953.pdf?src-supplier=Digikey; ComponentLink4Description: https://datasheet.ciiva.com/3/3000-3953.pdf?src-supplier=Digikey
footprint BAT_3000
pins: N NEG, P1 POS, P2 POS

## BGS12P2L6E6327XTSA1
designator U?
RF Switch Integrated Circuits; INFINEON; BGS12P2L6E6327XTSA1; 85 °C; 5.95 GHz; 320 µm; 6 GHz; Impedance: 50Ω; Insertion Loss (dB): 0.74dB; Clock Frequency: 6GHz; Max Junction Temperature (Tj): 125°C; Max Supply Current: 110µA; Number of Circuits: 1; Turn-On Delay Time: 700ns; Supplier: DigiKey; Supplier Part Number: 448-BGS12P2L6E6327XTSA1CT-ND; Manufacturer: Infineon; Manufacturer Part Number: BGS12P2L6E6327XTSA1; RoHS: Compliant; Category: RF Switches; Stock: 9157; Pricing: 1=0.37, 10=0.321, 25=0.302, 100=0.2762, 250=0.26056, 500=0.24954, 1000=0.2391, 5000=0.21709, 15000=0.20368, 30000=0.19585, 45000=0.19148 (USD); Ambient Temperature Range High: 85°C; Bandwidth: 5.95GHz; China RoHS: Compliant; Export Control Classification Number (ECCN) Code: EAR99; Height: 320µm; Harmonized Tariff Schedule (HTS) Code: 8536.50.70.00; Introduction Date: 2019-09-18; Lifecycle Status: Production; Max Operating Temperature: 85°C; Min Operating Temperature: -40°C; Mounting Technology: Surface Mount; Number of Terminals: 6; REACH SVHC: Yes; Schedule B: 8542390000, 8542390000|8542390000|8542390000|8542390000|8542390000; ComponentLink1URL: https://datasheet.octopart.com:443/BGS12P2L6E6327XTSA1-Infineon-datasheet-180052876.pdf?src-supplier=HQonline; ComponentLink1Description: https://datasheet.octopart.com:443/BGS12P2L6E6327XTSA1-Infineon-datasheet-180052876.pdf?src-supplier=HQonline; ComponentLink2URL: http://sigma.octopart.com:80/conflict_mineral_statement/Infineon-company-51.pdf?src-supplier=Compliance+Statements; ComponentLink2Description: http://sigma.octopart.com:80/conflict_mineral_statement/Infineon-company-51.pdf?src-supplier=Compliance+Statements; Supplier 1: DigiKey; Supplier Part Number 1: 448-BGS12P2L6E6327XTSA1CT-ND; Supplier 2: DigiKey; Supplier Part Number 2: 448-BGS12P2L6E6327XTSA1TR-ND; Supplier 3: Mouser; Supplier Part Number 3: 726-BGS12P2L6E6327XT
footprint PG-TSLP-6
pins: 1 RF2, 2 GND (power), 3 RF1, 4 VDD (power), 5 RFIN (in), 6 CTRL (in)

## BLM18AG151SN1D
designator FB?
Ferrite Beads Multi-Layer 150Ohm 25% 100MHz 500mA 250mOhm DCR 0603 Paper T/R; Manufacturer 1: Murata Electronics; Manufacturer: Murata; Suplier Unit Price 1: 0.1; DC Resistance (DCR): 250mΩ; Impedance: 150Ω; Material: Ferrite, Steel; Number of Circuits: 1; RMS Current (Irms): 700mA; Shielding: Unshielded; Datashee: http://www.murata.com/~/media/webrenewal/support/library/catalog/products/emc/emifil/c31e.ashx?la=en-gb; Height: 0.95mm; Manufacturer Part Number 1: BLM18AG151SN1D; Supplier Part Number 1: 81-BLM18AG151SN1D; Supplier Link 1: https://www.mouser.co.uk/ProductDetail/Murata-Electronics/BLM18AG151SN1D?qs=L3QzcrVjv96mFMbZqtrxVA%3D%3D; Supplier 1: Mouser; Supplier: Newark; Supplier Part Number: BLM18AG151SN1D; Manufacturer Part Number: BLM18AG151SN1D; RoHS: Compliant; Category: Ferrite Beads and Chips; Stock: 5330; Pricing: 10=0,058, 25=0,046, 50=0,044, 100=0,042, 250=0,036, 500=0,033, 1000=0,029 (USD); Case/Package: 0603; Case Code (Imperial): 0603; Case Code (Metric): 1608; Contact Plating: Tin; Core Material: Ferrite; Country of Origin: Japan, Thailand; Current Rating: 500mA; Depth: 800µm; Export Control Classification Number (ECCN) Code: EAR99; Harmonized Tariff Schedule (HTS) Code: 8504.50.80.00; Introduction Date: 2001-08-28; Lead Free: Lead Free; Length: 1.6mm; Lifecycle Status: Production; Max Current Rating: 500mA; Max DC Current: 500mA; Clock Frequency: 100MHz; Max Operating Temperature: 125°C; Min Operating Temperature: -55°C; Mounting Technology: Surface Mount; Number of Lines: 1; Pins: 2; Number of Terminals: 2; REACH SVHC: Yes; Schedule B: 8504500000, 8504500000|8504500000|8504500000|8504500000|8504500000; ESR: 250mΩ; Termination: SMD/SMT; Test Frequency: 100MHz; Tolerance: 25%; Width: 800µm; ComponentLink1URL: https://datasheet.octopart.com:443/BLM18AG151SN1D-Murata-datasheet-180806579.pdf?src-supplier=IHS; ComponentLink1Description: https://datasheet.octopart.com:443/BLM18AG151SN1D-Murata-datasheet-180806579.pdf?src-supplier=IHS; ComponentLink2URL: https://datasheet.octopart.com:443/BLM18AG151SN1D-Murata-datasheet-5338592.pdf?src-supplier=element14+APAC; ComponentLink2Description: https://datasheet.octopart.com:443/BLM18AG151SN1D-Murata-datasheet-5338592.pdf?src-supplier=element14+APAC; ComponentLink3URL: https://datasheet.octopart.com:443/BLM18AG151SN1D-Murata-datasheet-11743096.pdf?src-supplier=_legacy+Avnet; ComponentLink3Description: https://datasheet.octopart.com:443/BLM18AG151SN1D-Murata-datasheet-11743096.pdf?src-supplier=_legacy+Avnet; ComponentLink4URL: https://datasheet.octopart.com:443/BLM18AG151SN1D-Murata-datasheet-511221.pdf?src-supplier=TME; ComponentLink4Description: https://datasheet.octopart.com:443/BLM18AG151SN1D-Murata-datasheet-511221.pdf?src-supplier=TME; ComponentLink5URL: https://datasheet.octopart.com:443/BLM18AG151SN1D-Murata-datasheet-168040205.pdf?src-supplier=TME; ComponentLink5Description: https://datasheet.octopart.com:443/BLM18AG151SN1D-Murata-datasheet-168040205.pdf?src-supplier=TME; ComponentLink6URL: https://datasheet.octopart.com:443/BLM18AG151SN1D-Murata-datasheet-5396529.pdf?src-supplier=Future+Electronics; ComponentLink6Description: https://datasheet.octopart.com:443/BLM18AG151SN1D-Murata-datasheet-5396529.pdf?src-supplier=Future+Electronics; ComponentLink7URL: https://datasheet.octopart.com:443/BLM18AG151SN1D-Murata-datasheet-62086281.pdf?src-supplier=Future+Electronics; ComponentLink7Description: https://datasheet.octopart.com:443/BLM18AG151SN1D-Murata-datasheet-62086281.pdf?src-supplier=Future+Electronics; ComponentLink8URL: https://datasheet.octopart.com:443/BLM18AG151SN1D-Murata-datasheet-41195.pdf?src-supplier=Farnell; ComponentLink8Description: https://datasheet.octopart.com:443/BLM18AG151SN1D-Murata-datasheet-41195.pdf?src-supplier=Farnell; ComponentLink9URL: https://datasheet.octopart.com:443/BLM18AG151SN1D-Murata-datasheet-141257894.pdf?src-supplier=Ciiva; ComponentLink9Description: https://datasheet.octopart.com:443/BLM18AG151SN1D-Murata-datasheet-141257894.pdf?src-supplier=Ciiva; ComponentLink10URL: https://datasheet.octopart.com:443/BLM18AG151SN1D-Murata-datasheet-138706755.pdf?src-supplier=Ciiva; ComponentLink10Description: https://datasheet.octopart.com:443/BLM18AG151SN1D-Murata-datasheet-138706755.pdf?src-supplier=Ciiva; ComponentLink11URL: https://datasheet.octopart.com/BLM18AG151SN1D-Murata-datasheet-37129980.pdf; ComponentLink11Description: https://datasheet.octopart.com/BLM18AG151SN1D-Murata-datasheet-37129980.pdf; ComponentLink12URL: http://sigma.octopart.com:80/reach_statement/Murata-company-16.pdf?src-supplier=Compliance+Statements; ComponentLink12Description: http://sigma.octopart.com:80/reach_statement/Murata-company-16.pdf?src-supplier=Compliance+Statements
footprint BLM18SP221SN1B
pins: 1, 2